# Altium footprint library DIP.PcbLib: 7 footprints
Each footprint in its own frame and in the unit in brackets; x right, y up, seen from the top. Pads: shape width x height; smd on the part's side, far side on the other; paste and mask are expansions set on the pad; w line width, h text height; cw(c..) or ccw(c..) is an arc to the next point about the centre after c.
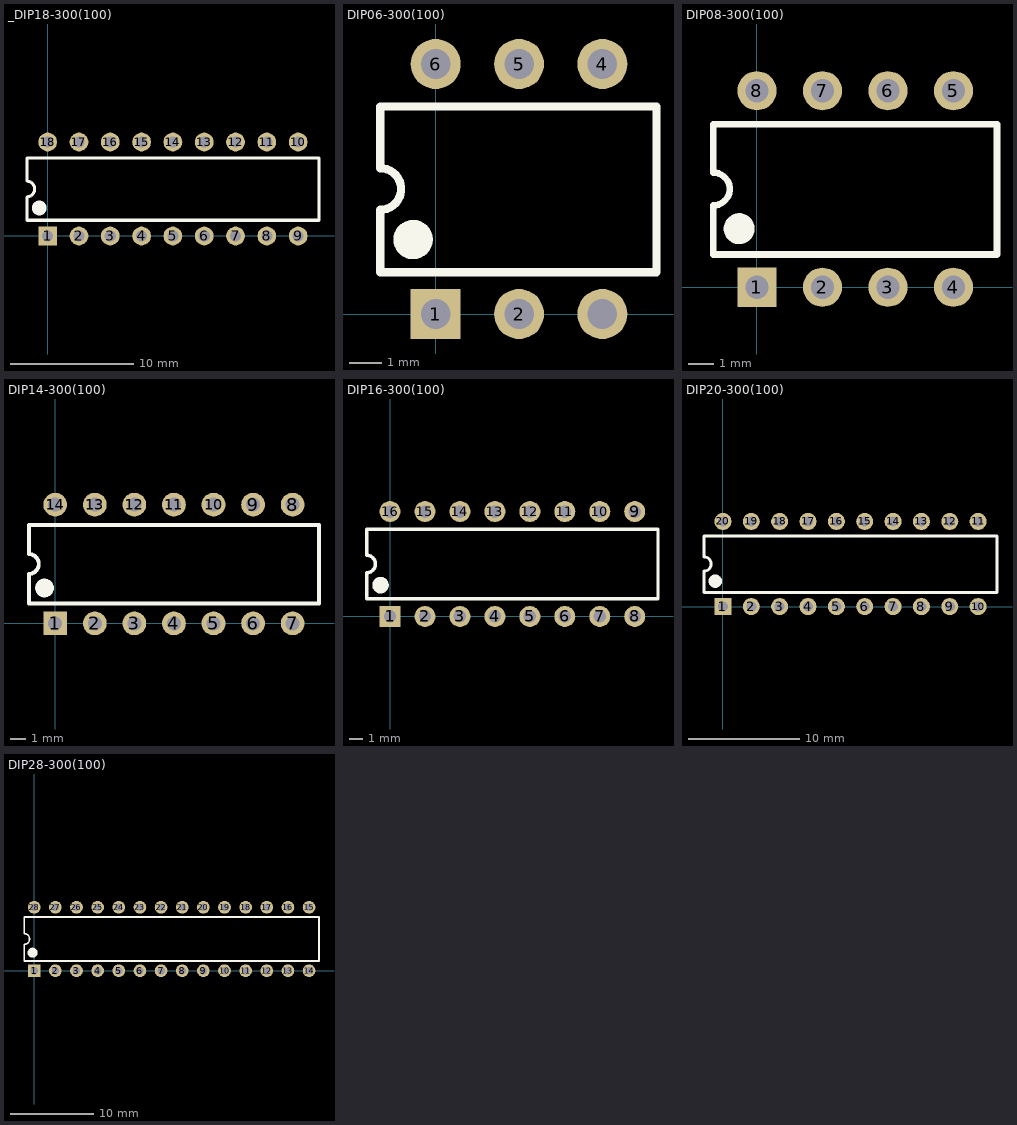
[diagram p0: the footprints below, top view; thin cyan lines are the x and y axes]

## _DIP18-300(100) [mil] "DIP, 18-Leads, Row Spacing 7.62mm, Pitch 2.54mm, Body 22.86x6.35mm"
height 210.24
pads (18):
  rect 60x60 hole 35.43: 1(0,0)
  round 60 hole 35.43: 2(100,0) 3(200,0) 4(300,0) 5(400,0) 6(500,0) 7(600,0) 8(700,0) 9(800,0) 10(800,300) 11(700,300) 12(600,300) 13(500,300) 14(400,300) 15(300,300) 16(200,300) 17(100,300) 18(0,300)
Top Overlay:
  circle w23.62: c-27.17,89.37 r11.81
  lines w10: -66.54,50 -66.54,125 ccw(c-66.54,150) -66.54,175 -66.54,249 866.54,249 866.54,50 -66.54,50
3D body "DIP18-300(100).STEP": height 170.87, standoff -147.44, extent -45,-5 840.83,303.7

## DIP06-300(100) [mil] "DIP; 6 Leads; Row Spacing 7.62 mm; Pitch 2.54 mm"
height 200
pads (6):
  rect 60x60 hole 35.43: 1(0,0)
  round 60 hole 35.43: 2(100,0) 4(200,300) 5(100,300) 6(0,300) ""(200,0)
Top Overlay:
  circle w23.62: c-27.16,89.37 r11.81
  lines w10: -66.53,50 265,50 265,249 -66.53,249 -66.53,175 cw(c-66.53,150) -66.53,125 -66.53,50
3D body "User Library-DIP6.STEP": height 208.66, standoff -78.74, extent -40,-4.92 240.31,304.92

## DIP08-300(100) [mil] "DIP; 8 Leads; Row Spacing 7.62 mm; Pitch 2.54 mm"
height 200
pads (8):
  rect 60x60 hole 35.43: 1(0,0)
  round 60 hole 35.43: 2(100,0) 3(200,0) 4(300,0) 5(300,300) 6(200,300) 7(100,300) 8(0,300)
Top Overlay:
  circle w23.62: c-27.16,89.37 r11.81
  lines w10: -66.53,50 -66.53,125 ccw(c-66.53,150) -66.53,175 -66.53,249 366.54,249 366.54,50 -66.53,50
3D body "DIP08-300(100).STEP": height 169.15, standoff -149.15, extent -47,-3.16 341.94,305.16

## DIP14-300(100) [mil] "DIP, 14-Leads, Row Spacing 7.62mm, Pitch 2.54mm"
height 210.24
pads (14):
  rect 60x60 hole 35.43: 1(0,0)
  round 60 hole 35.43: 2(100,0) 3(200,0) 4(300,0) 5(400,0) 6(500,0) 7(600,0) 8(600,300) 9(500,300) 10(400,300) 11(300,300) 12(200,300) 13(100,300) 14(0,300)
Top Overlay:
  circle w23.62: c-27.17,89.37 r11.81
  lines w10: -66.54,50 666.53,50 666.53,249 -66.54,249 -66.54,175 cw(c-66.54,150) -66.54,125 -66.54,50
3D body "DIP14-300(100).STEP": height 169.15, standoff -149.15, extent -85,-3.7 678.78,305

## DIP16-300(100) [mil] "DIP, 16-Leads, Row Spacing 7.62mm, Pitch 2.54mm, Body 22.86x6.35mm"
height 210.24
pads (16):
  rect 60x60 hole 35.43: 1(0,0)
  round 60 hole 35.43: 2(100,0) 3(200,0) 4(300,0) 5(400,0) 6(500,0) 7(600,0) 8(700,0) 9(700,300) 10(600,300) 11(500,300) 12(400,300) 13(300,300) 14(200,300) 15(100,300) 16(0,300)
Top Overlay:
  circle w23.62: c-27.17,89.37 r11.81
  lines w10: -66.54,50 766.53,50 766.53,249 -66.54,249 -66.54,175 cw(c-66.54,150) -66.54,125 -66.54,50
3D body "DIP16-300(100).STEP": height 159.15, standoff -159.15, extent -30,-5 733.78,303.31

## DIP20-300(100) [mil] "DIP, 20-Leads, Row Spacing 7.62mm, Pitch 2.54mm, Body 22.86x6.35mm"
height 210.24
pads (20):
  rect 60x60 hole 35.43: 1(0,0)
  round 60 hole 35.43: 2(100,0) 3(200,0) 4(300,0) 5(400,0) 6(500,0) 7(600,0) 8(700,0) 9(800,0) 10(900,0) 11(900,300) 12(800,300) 13(700,300) 14(600,300) 15(500,300) 16(400,300) 17(300,300) 18(200,300) 19(100,300) 20(0,300)
Top Overlay:
  circle w23.62: c-27.17,89.37 r11.81
  lines w10: -66.54,50 -66.54,125 ccw(c-66.54,150) -66.54,175 -66.54,249 966.54,249 966.54,50 -66.54,50

## DIP28-300(100) [mil] "DIP, 28-Leads, Row Spacing 7.62mm, Pitch 2.54mm, Body 34.67x7.3mm"
height 180.31
pads (28):
  rect 60x60 hole 35.43: 1(0,0)
  round 60 hole 35.43: 2(100,0) 3(200,0) 4(300,0) 5(400,0) 6(500,0) 7(600,0) 8(700,0) 9(800,0) 10(900,0) 11(1000,0) 12(1100,0) 13(1200,0) 14(1300,0) 15(1300,300) 16(1200,300) 17(1100,300) 18(1000,300) 19(900,300) 20(800,300) 21(700,300) 22(600,300) 23(500,300) 24(400,300) 25(300,300) 26(200,300) 27(100,300) 28(0,300)
Top Overlay:
  circle w23.62: c-7.48,85.04 r11.81
  lines w7.87: -46.85,45.67 -46.85,125 ccw(c-46.85,150) -46.85,175 -46.85,254.33 1346.85,254.33 1346.85,45.67 -46.85,45.67
3D body "DIP28-300(100).STEP": height 170.87, standoff -147.44, extent -101.97,-3.7 1401.97,305